# Altium footprint library WR-RAST.PcbLib: 73 footprints (part 5 of 5)
Each footprint in its own frame and in the unit in brackets; x right, y up, seen from the top. Pads: shape width x height; smd on the part's side, far side on the other; paste and mask are expansions set on the pad; w line width, h text height; cw(c..) or ccw(c..) is an arc to the next point about the centre after c.
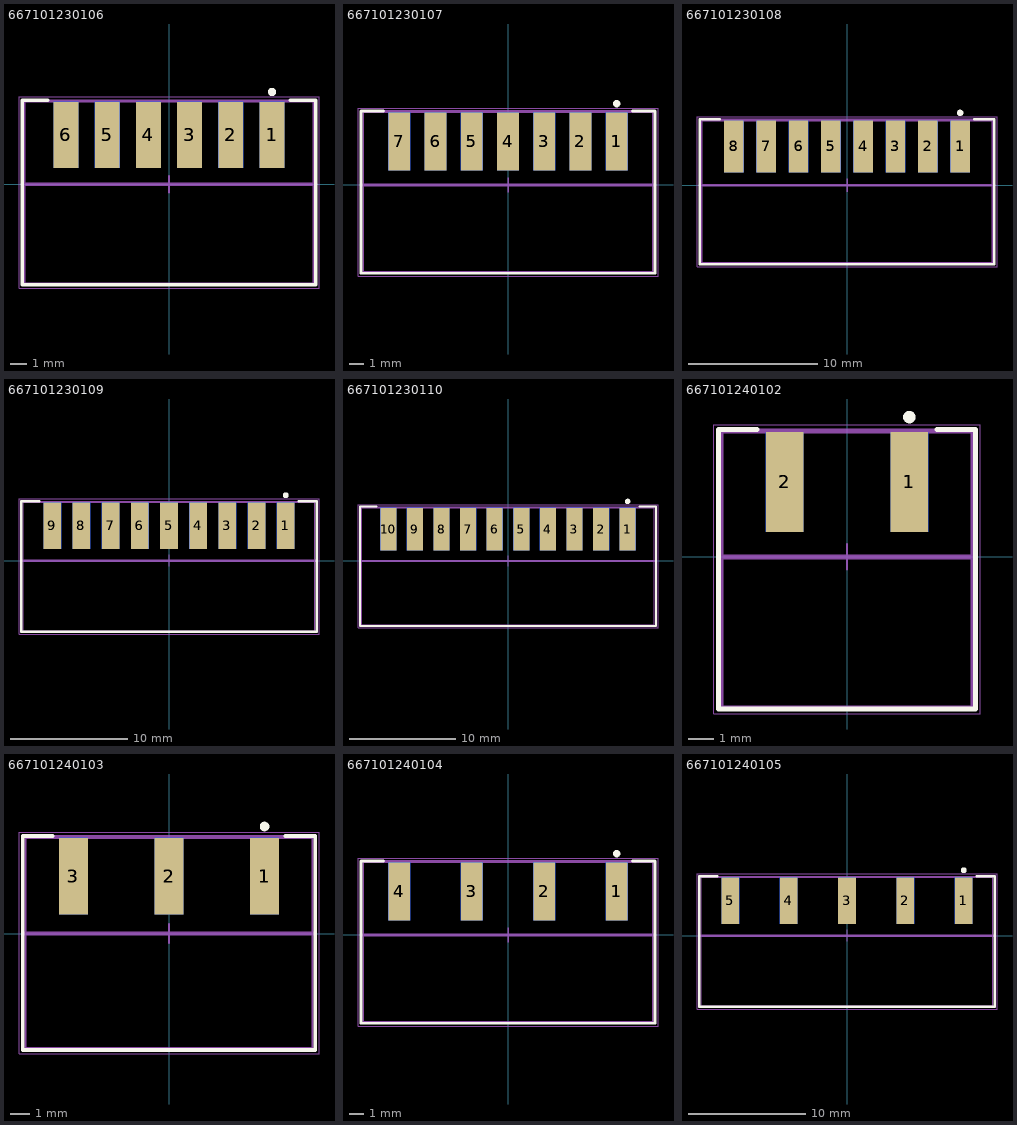
[diagram p4: the footprints below, top view; thin cyan lines are the x and y axes]

## 667101230106 [mm] "RAST 2.5 Housing 2.5mm Pitch for Direct or Indirect Mating without locking features， 06p"
height 7.35
pads (12):
  rect 1.5x4 smd: 1(6.25,3) 2(3.75,3) 3(1.25,3) 4(-1.25,3) 5(-3.75,3) 6(-6.25,3)
  rect 1.5x4 smd far side: 1(6.25,3) 2(3.75,3) 3(1.25,3) 4(-1.25,3) 5(-3.75,3) 6(-6.25,3)
Top Overlay:
  circle w0.25: c6.25,5.6 r0.125
  lines w0.2: -7.35,5.1 -8.9,5.1 -8.9,-6.1 8.9,-6.1 8.9,5.1 7.35,5.1
Assembly Notes:
  lines w0.2: -8.9,0 8.9,0
  text "PCB Edge" at -2.034,-1.082 h1
Top Assembly:
  lines w0.1: -8.9,-6.1 8.9,-6.1 8.9,5.1 -8.9,5.1 -8.9,-6.1
Top Designator:
  text ".Designator" at -3.647,-0.357 h1
Top 3D Body:
  lines w0.1: -8.75,-6 8.75,-6 8.75,5 -8.75,5 -8.75,-6
Top Courtyard:
  lines w0.05: -9.1,-6.3 9.1,-6.3 9.1,5.3 -9.1,5.3 -9.1,-6.3
Top Component Center:
  lines w0.1: -0.5,0 0.5,0 ; 0,-0.5 0,0.5
3D body "667101230106.stp": height 3.22, standoff -4.12, extent -8.75,-6 8.75,5

## 667101230107 [mm] "RAST 2.5 Housing 2.5mm Pitch for Direct or Indirect Mating without locking features， 07p"
height 7.35
pads (14):
  rect 1.5x4 smd far side: 1(7.5,3) 2(5,3) 3(2.5,3) 4(0,3) 5(-2.5,3) 6(-5,3) 7(-7.5,3)
  rect 1.5x4 smd: 1(7.5,3) 2(5,3) 3(2.5,3) 4(0,3) 5(-2.5,3) 6(-5,3) 7(-7.5,3)
Top Overlay:
  circle w0.25: c7.5,5.6 r0.125
  lines w0.2: -8.6,5.1 -10.15,5.1 -10.15,-6.1 10.15,-6.1 10.15,5.1 8.6,5.1
Assembly Notes:
  lines w0.2: -10.15,0 10.15,0
  text "PCB Edge" at -2.034,-1.082 h1
Top Assembly:
  lines w0.1: -10.15,-6.1 10.15,-6.1 10.15,5.1 -10.15,5.1 -10.15,-6.1
Top Designator:
  text ".Designator" at -3.647,-0.357 h1
Top 3D Body:
  lines w0.1: -10,-6 10,-6 10,5 -10,5 -10,-6
Top Courtyard:
  lines w0.05: -10.35,-6.3 10.35,-6.3 10.35,5.3 -10.35,5.3 -10.35,-6.3
Top Component Center:
  lines w0.1: -0.5,0 0.5,0 ; 0,-0.5 0,0.5
3D body "667101230107.stp": height 3.22, standoff -4.12, extent -10,-6 10,5

## 667101230108 [mm] "RAST 2.5 Housing 2.5mm Pitch for Direct or Indirect Mating without locking features， 08p"
height 7.35
pads (16):
  rect 1.5x4 smd: 1(8.75,3) 2(6.25,3) 3(3.75,3) 4(1.25,3) 5(-1.25,3) 6(-3.75,3) 7(-6.25,3) 8(-8.75,3)
  rect 1.5x4 smd far side: 1(8.75,3) 2(6.25,3) 3(3.75,3) 4(1.25,3) 5(-1.25,3) 6(-3.75,3) 7(-6.25,3) 8(-8.75,3)
Top Overlay:
  circle w0.25: c8.75,5.6 r0.125
  lines w0.2: -9.85,5.1 -11.4,5.1 -11.4,-6.1 11.4,-6.1 11.4,5.1 9.85,5.1
Assembly Notes:
  lines w0.2: -11.4,0 11.4,0
  text "PCB Edge" at -2.034,-1.082 h1
Top Assembly:
  lines w0.1: -11.4,-6.1 -11.4,5.1 11.4,5.1 11.4,-6.1 -11.4,-6.1
Top Designator:
  text ".Designator" at -3.647,-0.357 h1
Top 3D Body:
  lines w0.1: -11.25,-6 -11.25,5 11.25,5 11.25,-6 -11.25,-6
Top Courtyard:
  lines w0.05: -11.6,-6.3 -11.6,5.3 11.6,5.3 11.6,-6.3 -11.6,-6.3
Top Component Center:
  lines w0.1: -0.5,0 0.5,0 ; 0,-0.5 0,0.5
3D body "667101230108.stp": height 3.22, standoff -4.12, extent -11.25,-6 11.25,5

## 667101230109 [mm] "RAST 2.5 Housing 2.5mm Pitch for Direct or Indirect Mating without locking features， 09p"
height 7.35
pads (18):
  rect 1.5x4 smd far side: 1(10,3) 2(7.5,3) 3(5,3) 4(2.5,3) 5(0,3) 6(-2.5,3) 7(-5,3) 8(-7.5,3) 9(-10,3)
  rect 1.5x4 smd: 1(10,3) 2(7.5,3) 3(5,3) 4(2.5,3) 5(0,3) 6(-2.5,3) 7(-5,3) 8(-7.5,3) 9(-10,3)
Top Overlay:
  circle w0.25: c10,5.6 r0.125
  lines w0.2: -11.1,5.1 -12.65,5.1 -12.65,-6.1 12.65,-6.1 12.65,5.1 11.1,5.1
Assembly Notes:
  lines w0.2: -12.65,0 12.65,0
  text "PCB Edge" at -2.034,-1.082 h1
Top Assembly:
  lines w0.1: -12.65,-6.1 12.65,-6.1 12.65,5.1 -12.65,5.1 -12.65,-6.1
Top Designator:
  text ".Designator" at -3.647,-0.357 h1
Top 3D Body:
  lines w0.1: -12.5,-6 12.5,-6 12.5,5 -12.5,5 -12.5,-6
Top Courtyard:
  lines w0.05: -12.85,-6.3 12.85,-6.3 12.85,5.3 -12.85,5.3 -12.85,-6.3
Top Component Center:
  lines w0.1: -0.5,0 0.5,0 ; 0,-0.5 0,0.5
3D body "667101230109.stp": height 3.22, standoff -4.12, extent -12.5,-6 12.5,5

## 667101230110 [mm] "RAST 2.5 Housing 2.5mm Pitch for Direct or Indirect Mating without locking features， 10p"
height 7.35
pads (20):
  rect 1.5x4 smd: 1(11.25,3) 2(8.75,3) 3(6.25,3) 4(3.75,3) 5(1.25,3) 6(-1.25,3) 7(-3.75,3) 8(-6.25,3) 9(-8.75,3) 10(-11.25,3)
  rect 1.5x4 smd far side: 1(11.25,3) 2(8.75,3) 3(6.25,3) 4(3.75,3) 5(1.25,3) 6(-1.25,3) 7(-3.75,3) 8(-6.25,3) 9(-8.75,3) 10(-11.25,3)
Top Overlay:
  circle w0.25: c11.25,5.6 r0.125
  lines w0.2: -12.35,5.1 -13.9,5.1 -13.9,-6.1 13.9,-6.1 13.9,5.1 12.35,5.1
Assembly Notes:
  lines w0.2: -13.9,0 13.9,0
  text "PCB Edge" at -2.034,-1.082 h1
Top Assembly:
  lines w0.1: -13.9,-6.1 13.9,-6.1 13.9,5.1 -13.9,5.1 -13.9,-6.1
Top Designator:
  text ".Designator" at -3.647,-0.357 h1
Top 3D Body:
  lines w0.1: -13.75,-6 13.75,-6 13.75,5 -13.75,5 -13.75,-6
Top Courtyard:
  lines w0.05: -14.1,-6.3 14.1,-6.3 14.1,5.3 -14.1,5.3 -14.1,-6.3
Top Component Center:
  lines w0.1: -0.5,0 0.5,0 ; 0,-0.5 0,0.5
3D body "667101230110.stp": height 3.22, standoff -4.12, extent -13.75,-6 13.75,5

## 667101240102 [mm] "RAST 2.5 Housing 2.5mm Pitc for Direct or Indirect Mating without lockign features, 02p"
height 7.35
pads (4):
  rect 1.5x4 smd: 1(2.5,3) 2(-2.5,3)
  rect 1.5x4 smd far side: 1(2.5,3) 2(-2.5,3)
Top Overlay:
  circle w0.25: c2.5,5.6 r0.125
  lines w0.2: -3.6,5.1 -5.15,5.1 -5.15,-6.1 5.15,-6.1 5.15,5.1 3.6,5.1
Assembly Notes:
  lines w0.2: -5.15,0 5.15,0
  text "PCB Edge" at -2.034,-1.182 h1
Top Assembly:
  lines w0.1: -5.15,-6.1 -5.15,5.1 5.15,5.1 5.15,-6.1 -5.15,-6.1
Top Designator:
  text ".Designator" at -3.647,-0.357 h1
Top 3D Body:
  lines w0.1: -5,-6 -5,5 5,5 5,-6 -5,-6
Top Courtyard:
  lines w0.05: -5.35,-6.3 -5.35,5.3 5.35,5.3 5.35,-6.3 -5.35,-6.3
Top Component Center:
  lines w0.1: -0.5,0 0.5,0 ; 0,-0.5 0,0.5
3D body "667101240102.stp": height 3.22, standoff -4.12, extent -5,-6 5,5

## 667101240103 [mm] "RAST 2.5 Housing 2.5mm Pitc for Direct or Indirect Mating without lockign features, 03p"
height 7.35
pads (6):
  rect 1.5x4 smd far side: 1(5,3) 2(0,3) 3(-5,3)
  rect 1.5x4 smd: 1(5,3) 2(0,3) 3(-5,3)
Top Overlay:
  circle w0.25: c5,5.6 r0.125
  lines w0.2: -6.1,5.1 -7.65,5.1 -7.65,-6.1 7.65,-6.1 7.65,5.1 6.1,5.1
Assembly Notes:
  lines w0.2: -7.65,0 7.65,0
  text "PCB Edge" at -2.034,-1.182 h1
Top Assembly:
  lines w0.1: -7.65,-6.1 -7.65,5.1 7.65,5.1 7.65,-6.1 -7.65,-6.1
Top Designator:
  text ".Designator" at -3.647,-0.357 h1
Top 3D Body:
  lines w0.1: -7.5,-6 -7.5,5 7.5,5 7.5,-6 -7.5,-6
Top Courtyard:
  lines w0.05: -7.85,-6.3 -7.85,5.3 7.85,5.3 7.85,-6.3 -7.85,-6.3
Top Component Center:
  lines w0.1: -0.5,0 0.5,0 ; 0,-0.5 0,0.5
3D body "667101240103.stp": height 3.22, standoff -4.12, extent -7.5,-6 7.5,5

## 667101240104 [mm] "RAST 2.5 Housing 2.5mm Pitc for Direct or Indirect Mating without lockign features, 04p"
height 7.35
pads (8):
  rect 1.5x4 smd: 1(7.5,3) 2(2.5,3) 3(-2.5,3) 4(-7.5,3)
  rect 1.5x4 smd far side: 1(7.5,3) 2(2.5,3) 3(-2.5,3) 4(-7.5,3)
Top Overlay:
  circle w0.25: c7.5,5.6 r0.125
  lines w0.2: -8.6,5.1 -10.15,5.1 -10.15,-6.1 10.15,-6.1 10.15,5.1 8.6,5.1
Assembly Notes:
  lines w0.2: -10.15,0 10.15,0
  text "PCB Edge" at -2.034,-1.182 h1
Top Assembly:
  lines w0.1: -10.15,-6.1 -10.15,5.1 10.15,5.1 10.15,-6.1 -10.15,-6.1
Top Designator:
  text ".Designator" at -3.647,-0.357 h1
Top 3D Body:
  lines w0.1: -10,-6 -10,5 10,5 10,-6 -10,-6
Top Courtyard:
  lines w0.05: -10.35,-6.3 -10.35,5.3 10.35,5.3 10.35,-6.3 -10.35,-6.3
Top Component Center:
  lines w0.1: -0.5,0 0.5,0 ; 0,-0.5 0,0.5
3D body "667101240104.stp": height 3.22, standoff -4.12, extent -10,-6 10,5

## 667101240105 [mm] "RAST 2.5 Housing 2.5mm Pitc for Direct or Indirect Mating without lockign features, 05p"
height 7.35
pads (10):
  rect 1.5x4 smd far side: 1(10,3) 2(5,3) 3(0,3) 4(-5,3) 5(-10,3)
  rect 1.5x4 smd: 1(10,3) 2(5,3) 3(0,3) 4(-5,3) 5(-10,3)
Top Overlay:
  circle w0.25: c10,5.6 r0.125
  lines w0.2: -11.1,5.1 -12.65,5.1 -12.65,-6.1 12.65,-6.1 12.65,5.1 11.1,5.1
Assembly Notes:
  lines w0.2: -12.65,0 12.65,0
  text "PCB Edge" at -2.034,-1.182 h1
Top Assembly:
  lines w0.1: -12.65,-6.1 12.65,-6.1 12.65,5.1 -12.65,5.1 -12.65,-6.1
Top Designator:
  text ".Designator" at -3.647,-0.357 h1
Top 3D Body:
  lines w0.1: -12.5,-6 12.5,-6 12.5,5 -12.5,5 -12.5,-6
Top Courtyard:
  lines w0.05: -12.85,-6.3 12.85,-6.3 12.85,5.3 -12.85,5.3 -12.85,-6.3
Top Component Center:
  lines w0.1: -0.5,0 0.5,0 ; 0,-0.5 0,0.5
3D body "667101240105.stp": height 3.22, standoff -4.12, extent -12.5,-6 12.5,5